# Altium integrated library ATK-DLRK3506B V1.0.IntLib: 64 symbols
Pins are listed as number, name and electrical type; pins without a type are passive.

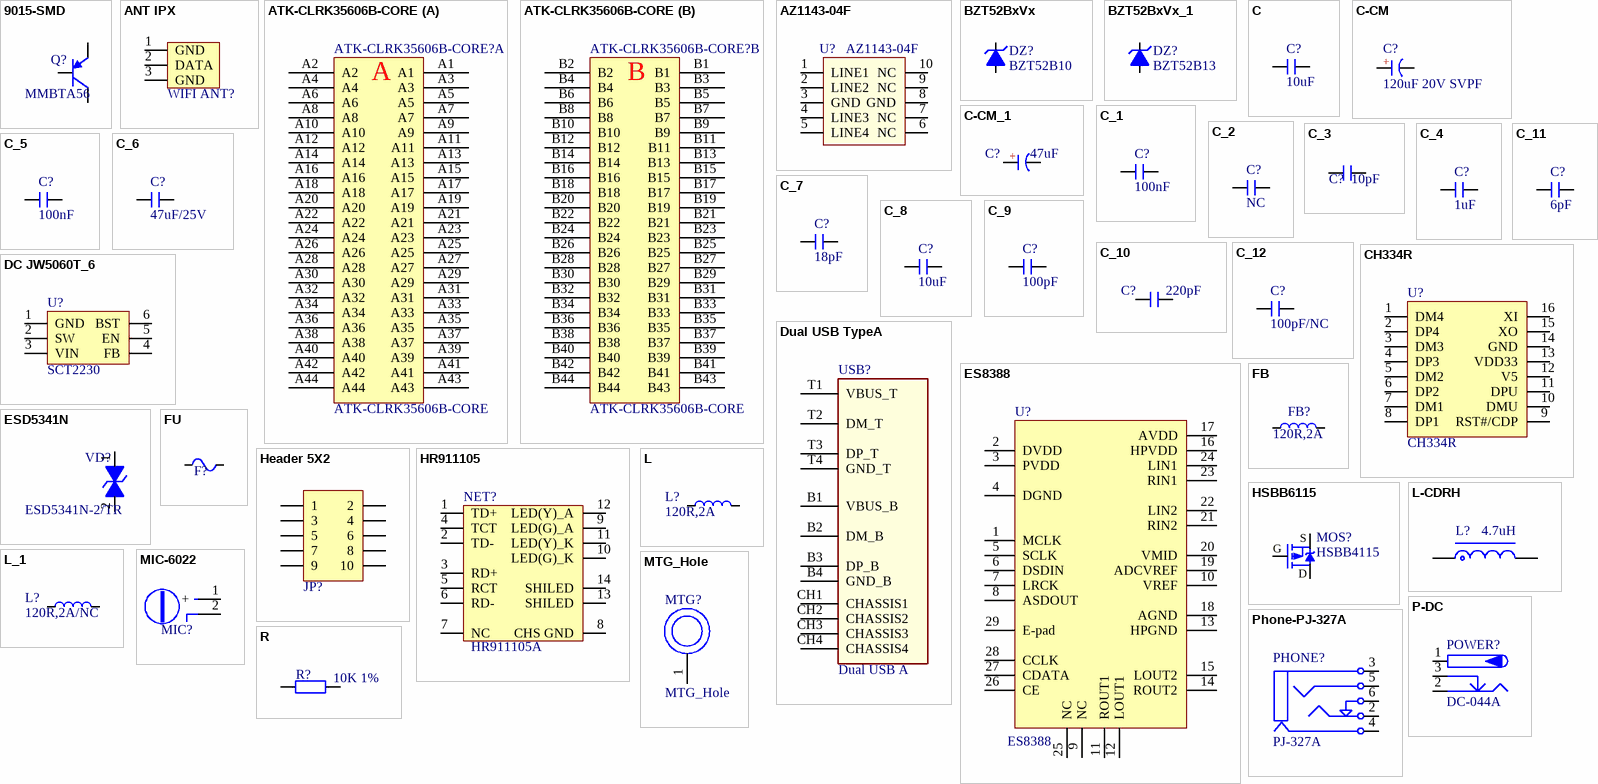
[diagram p0: symbols 9015-SMD to R]

## 9015-SMD
designator Q?, comment MMBTA56
低噪放大-PNP型; BOM名称: 三极管; 版权归属: 正点原子; 属性: 50V 0.1A 0.4W 150MHZ; 学习资源: www.ooocke.com
footprint SOT23-3N (3x1.3x1mm(长宽高))
footprint SOT23-3L (3x1.3x1mm(长宽高))
footprint SOT23-3M (3x1.3x1mm(长宽高))
pins: 1 B, 2 E, 3 C

## ANT IPX
designator WIFI ANT?  (value not drawn)
贴片射频连接器/天线座子
footprint IPX
footprint IPX
pins: 1 GND, 2 DATA, 3 GND

## ATK-CLRK35606B-CORE
designator ATK-CLRK35606B-CORE?
正点原子RK3506核心板整体封装（底板用）
footprint ATK-CLRK35606B-CORE (正点原子RK3506核心板整体封装（底板用）)
part A pins: A1, A2, A3, A4, A5, A6, A7, A8, A9, A10, A11, A12, A13, A14, A15, A16, A17, A18, A19, A20, A21, A22, A23, A24, A25, A26, A27, A28, A29, A30, A31, A32, A33, A34, A35, A36, A37, A38, A39, A40, A41, A42, A43, A44
part B pins: B1, B2, B3, B4, B5, B6, B7, B8, B9, B10, B11, B12, B13, B14, B15, B16, B17, B18, B19, B20, B21, B22, B23, B24, B25, B26, B27, B28, B29, B30, B31, B32, B33, B34, B35, B36, B37, B38, B39, B40, B41, B42, B43, B44
part A text: A
part B text: B

## AZ1143-04F
designator U?
ESD保护二极管阵列
footprint DFN2510P10E
pins: 1 LINE1, 2 LINE2, 3 GND, 4 LINE3, 5 LINE4, 6 NC, 7 NC, 8 GND, 9 NC, 10 NC

## BZT52BxVx
designator DZ?, comment BZT52B10
CJ x.xV / 0.5W稳压管  2%; 版权归属: 正点原子; BOM名称: 二极管(稳压); 学习资源: www.openedv.com
footprint SOD-123 (2.7x1.6X1.1mm（长宽高，不包括引脚）)
footprint SMB (二极管 SMB)
footprint SOD-123 (二极管)
pins: 1 A, 2 K

## BZT52BxVx_1
designator DZ?, comment BZT52B13
CJ x.xV / 0.5W稳压管  2%; 版权归属: 正点原子; BOM名称: 二极管(稳压); 学习资源: www.openedv.com
footprint SOD-123 (2.7x1.6X1.1mm（长宽高，不包括引脚）)
footprint Model Name (Model Description)
footprint Model Name (Model Description)
footprint SMB (二极管 SMB)
footprint SOD-123 (二极管)
pins: 1 A, 2 K

## C
designator C?, comment 10uF
无极性电容; BOM名称: 无极性贴片电容; 版权归属: 正点原子; 学习资源: www.openedv.com
footprint C 0402 (无极性贴片电容(0402))
pins: 1, 2

## C-CM
designator C?, comment 120uF 20V SVPF
贴片电解电容; 版权归属: 源创客; BOM名称: 贴片电解电容; 学习资源: www.ooocke.com
footprint CM A(3*5.4) (贴片电解电容，直径3mm，高5.4mm)
footprint CM B(4*5.4) (贴片电解电容，直径4mm，高5.4mm)
footprint CM C(5*5.4) (贴片电解电容，直径5mm，高5.4mm)
footprint CM D(6.3*5.4) (贴片电解电容，直径6.3mm，高5.4mm)
footprint CM D(6.3*7.7) (贴片电解电容，直径6.3mm，高7.7mm)
footprint CM E(8*6.2) (贴片电解电容，直径8mm，高6.2mm)
footprint CM E(8*10.2) (贴片电解电容，直径8mm，高10.2mm)
footprint CM F(10*10.2) (贴片电解电容，直径10mm，高10.2mm)
footprint CM G(12.5*13.5) (贴片电解电容，直径12.5mm，高13.5mm)
footprint CM G(12.5*16) (贴片电解电容，直径12.5mm，高16mm)
footprint CM H(16*16.5) (贴片电解电容，直径16mm，高16.5mm)
pins: 1 A, 2 K
text: +

## C-CM_1
designator C?, comment 47uF
贴片电解电容; 版权归属: 源创客; BOM名称: 贴片电解电容; 学习资源: www.ooocke.com
footprint CM A(3*5.4) (贴片电解电容，直径3mm，高5.4mm)
footprint CM B(4*5.4) (贴片电解电容，直径4mm，高5.4mm)
footprint CM C(5*5.4) (贴片电解电容，直径5mm，高5.4mm)
footprint CM D(6.3*5.4) (贴片电解电容，直径6.3mm，高5.4mm)
footprint CM D(6.3*7.7) (贴片电解电容，直径6.3mm，高7.7mm)
footprint CM E(8*6.2) (贴片电解电容，直径8mm，高6.2mm)
footprint CM E(8*10.2) (贴片电解电容，直径8mm，高10.2mm)
footprint CM F(10*10.2) (贴片电解电容，直径10mm，高10.2mm)
footprint CM G(12.5*13.5) (贴片电解电容，直径12.5mm，高13.5mm)
footprint CM G(12.5*16) (贴片电解电容，直径12.5mm，高16mm)
footprint CM H(16*16.5) (贴片电解电容，直径16mm，高16.5mm)
pins: 1 A, 2 K
text: +

## C_1
designator C?, comment 100nF
无极性电容; BOM名称: 无极性贴片电容; 版权归属: 正点原子; 学习资源: www.openedv.com
footprint C 0402 (无极性贴片电容(0402))
pins: 1, 2

## C_2
designator C?, comment NC
无极性电容; BOM名称: 无极性贴片电容; 版权归属: 正点原子; 学习资源: www.openedv.com
footprint C 0402 (无极性贴片电容(0402))
pins: 1, 2

## C_3
designator C?, comment 10pF
无极性电容; BOM名称: 无极性贴片电容; 版权归属: 正点原子; 学习资源: www.openedv.com
footprint C 0402 (无极性贴片电容(0402))
pins: 1, 2

## C_4
designator C?, comment 1uF
无极性贴片电容; 版权归属: 源创客; BOM名称: 无极性贴片电容; 学习资源: www.ooocke.com
footprint C 0402 (无极性贴片电容(0402))
pins: 1, 2

## C_5
designator C?, comment 100nF
无极性贴片电容; 版权归属: 源创客; BOM名称: 无极性贴片电容; 学习资源: www.ooocke.com
footprint C 0402 (无极性贴片电容(0402))
pins: 1, 2

## C_6
designator C?, comment 47uF/25V
无极性贴片电容; 版权归属: 源创客; BOM名称: 无极性贴片电容; 学习资源: www.ooocke.com
footprint C 0201 (无极性贴片电容)
footprint C 0402 (无极性贴片电容)
footprint C 0603 (无极性贴片电容)
footprint C 0805 (无极性贴片电容)
footprint C 1206 (无极性贴片电容)
footprint C 1210 (无极性贴片电容)
footprint C 1808 (无极性贴片电容)
footprint C 1812 (无极性贴片电容)
footprint C 1825 (无极性贴片电容)
footprint C 2225 (无极性贴片电容)
pins: 1, 2

## C_7
designator C?, comment 18pF
无极性电容; BOM名称: 无极性贴片电容; 版权归属: 正点原子; 学习资源: www.openedv.com
footprint C 0402 (无极性贴片电容(0402))
pins: 1, 2

## C_8
designator C?, comment 10uF
无极性贴片电容; 版权归属: 源创客; BOM名称: 无极性贴片电容; 学习资源: www.ooocke.com
footprint C 0402 (无极性贴片电容(0402))
pins: 1, 2

## C_9
designator C?, comment 100pF
无极性贴片电容; 版权归属: 源创客; BOM名称: 无极性贴片电容; 学习资源: www.ooocke.com
footprint C 0402 (无极性贴片电容(0402))
pins: 1, 2

## C_10
designator C?, comment 220pF
无极性贴片电容; 版权归属: 源创客; BOM名称: 无极性贴片电容; 学习资源: www.ooocke.com
footprint C 0402 (无极性贴片电容(0402))
pins: 1, 2

## C_11
designator C?, comment 6pF
无极性贴片电容; 版权归属: 源创客; BOM名称: 无极性贴片电容; 学习资源: www.ooocke.com
footprint C 0402 (无极性贴片电容(0402))
pins: 1, 2

## C_12
designator C?, comment 100pF/NC
无极性贴片电容; 版权归属: 源创客; BOM名称: 无极性贴片电容; 学习资源: www.ooocke.com
footprint C 0402 (无极性贴片电容(0402))
pins: 1, 2

## CH334R
designator U?
4端口USB HUB控制器, USB2.0
footprint QSOP16 (TSOP, 16-Leads, Body 4.90x3.90mm, Pitch 0.64mm, IPC Low Density)
pins: 1 DM4, 2 DP4, 3 DM3, 4 DP3, 5 DM2, 6 DP2, 7 DM1, 8 DP1, 9 RST#/CDP, 10 DMU, 11 DPU, 12 V5, 13 VDD33, 14 GND, 15 XO, 16 XI

## DC JW5060T_6
designator U?, comment SCT2230
DC降压芯片
footprint SOT23-6L (3x1.6x1.1mm(长宽高))
footprint SOT23-6M (3x1.6x1.1mm(长宽高))
footprint SOT23-6N (3x1.6x1.1mm(长宽高))
pins: 1 GND, 2 SW, 3 VIN, 4 FB, 5 EN, 6 BST

## Dual USB TypeA
designator USB?, comment Dual USB A
footprint Dual USB TypeA (双USB TypeA座)
pins: B1 VBUS_B, B2 DM_B, B3 DP_B, B4 GND_B, CH1 CHASSIS1, CH2 CHASSIS2, CH3 CHASSIS3, CH4 CHASSIS4, T1 VBUS_T, T2 DM_T, T3 DP_T, T4 GND_T

## ES8388
designator U?
footprint QFN28 4X4_L (QFN28P 长4mm，宽4mm)
pins: 1 MCLK, 2 DVDD, 3 PVDD, 4 DGND, 5 SCLK, 6 DSDIN, 7 LRCK, 8 ASDOUT, 9 NC, 10 VREF, 11 ROUT1, 12 LOUT1, 13 HPGND, 14 ROUT2, 15 LOUT2, 16 HPVDD, 17 AVDD, 18 AGND, 19 ADCVREF, 20 VMID, 21 RIN2, 22 LIN2, 23 RIN1, 24 LIN1, 25 NC, 26 CE, 27 CDATA, 28 CCLK, 29 E-pad

## ESD5341N
designator VD?, comment ESD5341N-2/TR
ESD二极管-单向
footprint ESD0402
pins: 1, 2

## FB
designator FB?, comment 120R,2A
贴片磁珠; BOM名称: 小功率贴片电感; 版权归属: 正点原子; Parameter: 电感/磁珠; 学习资源: www.openedv.com
footprint L 0402 (小功率贴片电感)
footprint L 0603 (小功率贴片电感)
footprint L 0805 (小功率贴片电感)
footprint L 1206 (小功率贴片电感)
footprint L 1210 (小功率贴片电感)
footprint L 1806 (小功率贴片电感)
footprint L 1812 (小功率贴片电感)
footprint L 1008 (2.5mm*2.0mm*1.2mm(长*宽*高）)
footprint L_2520
pins: 1, 2

## FU
designator F?, comment 2A 保险丝  (value not drawn)
贴片保险丝; 版权归属: 源创客; BOM名称: 贴片保险丝; 学习资源: www.ooocke.com
footprint FU 0402 (贴片保险丝)
footprint FU 0603 (贴片保险丝)
footprint FU 0805 (贴片保险丝)
footprint FU 1206 (贴片保险丝)
footprint FU 1210 (贴片保险丝)
footprint FU 1812 (贴片保险丝)
pins: 1, 2

## Header 5X2
designator JP?  (value not drawn)
5*2P接插件; 版权归属: 正点原子; Parameter: 接插件; BOM名称: 5*2P接插件; 学习资源: www.openedv.com
footprint HDR-5X2 (双排排针，5x2脚)
footprint IDC2.54-10P (10P简易牛角座)
footprint HDR-5X2_H (双排弯脚排针，5x2脚)
footprint PHB2.0-2x5 (长：12mm，宽：7.3mm，高：7.8mm)
footprint PHD2.0-2x5P (10脚，长：12mm，宽：5mm，高：6.5mm)
footprint HDR2.54 2x5-M-SMD (脚距：2.54mm，贴片双排母)
footprint HDR1.27 2x5-M-SMD (脚距：1.27mm，贴片双排母)
footprint HDR1.27 2x5-SMD (脚距：1.27mm，贴片双排母)
footprint Header 2.54 2X5P (排针(2X5P,2.54,直插))
pins: 1, 2, 3, 4, 5, 6, 7, 8, 9, 10

## HR911105
designator NET?, comment HR911105A
footprint HR911105A (NET_WORK)
pins: 1 TD+, 2 TD-, 3 RD+, 4 TCT, 5 RCT, 6 RD-, 7 NC, 8 CHS GND, 9 LED(G)_A, 10 LED(G)_K, 11 LED(Y)_K, 12 LED(Y)_A, 13 SHILED, 14 SHILED

## HSBB6115
designator MOS?, comment HSBB4115
PMOS -60V -8A@-4.5V 33mΩ; BOM名称: MOS管; 版权归属: 正点原子; 学习资源: www.openedv.com
footprint DFN3.3x3.3_8L_EP1
footprint VDFN10-3X3
footprint DFN8_ 3x3
pins: 1 S, 2 S, 3 G, 4 G, 5 D, 6 D, 7 D, 8 D

## L
designator L?, comment 120R,2A
小功率贴片电感磁珠; 版权归属: 正点原子; BOM名称: 小功率贴片电感; 学习资源: www.openedv.com
footprint L 0402 (小功率贴片电感)
footprint L 0603 (小功率贴片电感)
footprint L 0805 (小功率贴片电感)
footprint L 1206 (小功率贴片电感)
footprint L 1210 (小功率贴片电感)
footprint L 1806 (小功率贴片电感)
footprint L 1812 (小功率贴片电感)
footprint L 1008 (2.5mm*2.0mm*1.2mm(长*宽*高）)
footprint L_2520
pins: 1, 2

## L-CDRH
designator L?, comment 4.7uH
功率屏蔽电感; 版权归属: 源创客; BOM名称: 功率屏蔽电感; 学习资源: www.ooocke.com
footprint CDRH73 (7.3*7.3*3.4mm（长宽高）)
footprint CDRH74 (7.3*7.3*4.5mm（长宽高）)
footprint CDRH124 (12*12*4.5mm（长宽高）)
footprint CDRH125 (12*12*5mm（长宽高）)
footprint CDRH127 (12*12*8mm（长宽高）)
footprint CDRH129 (12*12*9.5mm（长宽高）)
footprint L-SMD-0420 (一体化成型电感 4*4.5*2mm（长宽高）)
pins: 1, 2

## L_1
designator L?, comment 120R,2A/NC
小功率贴片电感磁珠; 版权归属: 正点原子; BOM名称: 小功率贴片电感; 学习资源: www.openedv.com
footprint L 0402 (小功率贴片电感)
footprint L 0603 (小功率贴片电感)
footprint L 0805 (小功率贴片电感)
footprint L 1206 (小功率贴片电感)
footprint L 1210 (小功率贴片电感)
footprint L 1806 (小功率贴片电感)
footprint L 1812 (小功率贴片电感)
footprint L 1008 (2.5mm*2.0mm*1.2mm(长*宽*高）)
footprint L_2520
pins: 1, 2

## MIC-6022
designator MIC?  (value not drawn)
MIC; 版权归属: 正点原子; Parameter: 接口器件; 学习资源: www.openedv.com
footprint MIC-6022
pins: 1 +, 2 GND

## MTG_Hole
designator MTG?
螺丝孔
footprint MTG_HOLE_M3 (M3l螺丝孔)
footprint M3-6ET (Footprint not found)
pins: 1

## P-DC
designator POWER?, comment DC-044A
低压电源接口; BOM名称: DC电源接口; 版权归属: 源创客; 学习资源: www.ooocke.com
footprint DC-012 (5.5*2.1)
footprint DC-005 (5.5*2.1mm，DC30V,2.5A)
footprint DC-002 (3.5*1.1mm,)
footprint DC-003 (3.5*1.1mm)
footprint DC-003A (3.5*1.1mm)
footprint DC-050 (5.5*2.1)
footprint DC10B
footprint DC10B
footprint DC44A
footprint DC44A
footprint dc-in-th_dc-044a-25a
pins: 1 (power), 2 (power), 3 (power)

## Phone-PJ-327A
designator PHONE?, comment PJ-327A
3.5mm耳机座，带拔插检测; 版权归属: 正点原子; Parameter: 接口器件; 学习资源: www.openedv.com
footprint PJ327A (有头)
pins: 2, 3 1, 4, 5, 6

## R
designator R?, comment 10K 1%
贴片电阻; BOM名称: 电阻; 版权归属: 正点原子; 学习资源: www.openedv.com
footprint R 0402 (1/16W贴片电阻)
footprint R 0603 (1/10W贴片电阻)
pins: 1, 2

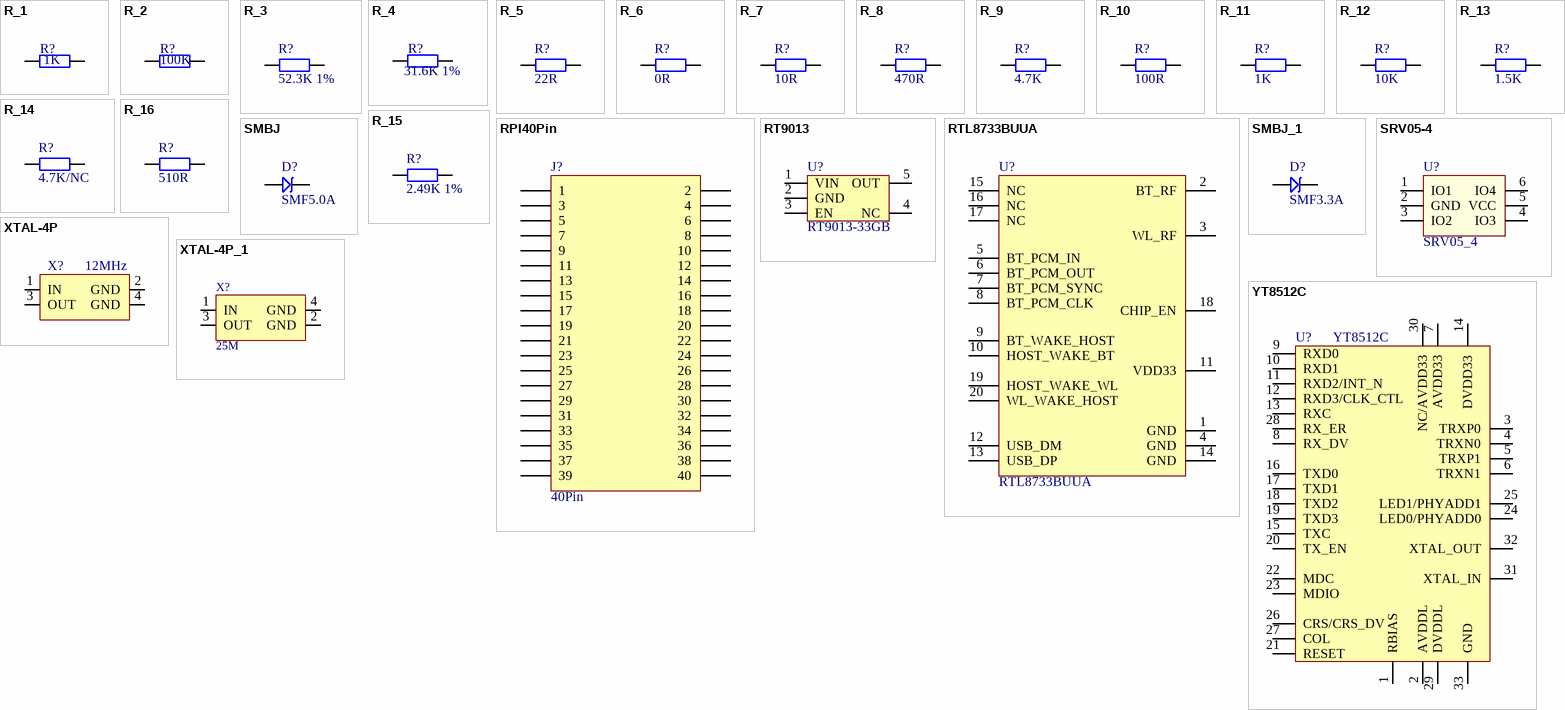
[diagram p1: symbols R_1 to YT8512C]

## R_1
designator R?, comment 1K
贴片电阻; BOM名称: 电阻; 版权归属: 正点原子; 学习资源: www.openedv.com
footprint R 0402 (1/16W贴片电阻)
footprint R 0603 (1/10W贴片电阻)
pins: 1, 2

## R_2
designator R?, comment 100K
贴片电阻; BOM名称: 电阻; 版权归属: 正点原子; 学习资源: www.openedv.com
footprint R 0402 (1/16W贴片电阻)
footprint R 0603 (1/10W贴片电阻)
pins: 1, 2

## R_3
designator R?, comment 52.3K 1%
贴片电阻; BOM名称: 电阻; 版权归属: 正点原子; 学习资源: www.openedv.com
footprint R 0402 (1/16W贴片电阻)
footprint R 0603 (1/10W贴片电阻)
pins: 1, 2

## R_4
designator R?, comment 31.6K 1%
贴片电阻; BOM名称: 电阻; 版权归属: 正点原子; 学习资源: www.openedv.com
footprint R 0402 (1/16W贴片电阻)
footprint R 0603 (1/10W贴片电阻)
pins: 1, 2

## R_5
designator R?, comment 22R
贴片电阻; BOM名称: 电阻; 版权归属: 正点原子; 学习资源: www.openedv.com
footprint R 0402 (1/16W贴片电阻)
footprint R 0603 (1/10W贴片电阻)
pins: 1, 2

## R_6
designator R?, comment 0R
贴片电阻; BOM名称: 电阻; 版权归属: 正点原子; 学习资源: www.openedv.com
footprint R 0402 (1/16W贴片电阻)
footprint R 0603 (1/10W贴片电阻)
pins: 1, 2

## R_7
designator R?, comment 10R
贴片电阻; BOM名称: 电阻; 版权归属: 正点原子; 学习资源: www.openedv.com
footprint R 0402 (1/16W贴片电阻)
footprint R 0603 (1/10W贴片电阻)
pins: 1, 2

## R_8
designator R?, comment 470R
贴片电阻; BOM名称: 电阻; 版权归属: 正点原子; 学习资源: www.openedv.com
footprint R 0402 (1/16W贴片电阻)
footprint R 0603 (1/10W贴片电阻)
pins: 1, 2

## R_9
designator R?, comment 4.7K
贴片电阻; BOM名称: 电阻; 版权归属: 正点原子; 学习资源: www.openedv.com
footprint R 0402 (1/16W贴片电阻)
footprint R 0603 (1/10W贴片电阻)
pins: 1, 2

## R_10
designator R?, comment 100R
贴片电阻; BOM名称: 电阻; 版权归属: 正点原子; 学习资源: www.openedv.com
footprint R 0402 (1/16W贴片电阻)
footprint R 0603 (1/10W贴片电阻)
pins: 1, 2

## R_11
designator R?, comment 1K
电阻; BOM名称: 贴片电阻; 版权归属: 正点原子; 学习资源: www.openedv.com; Parameter: 电阻
footprint R 0402 (1/16W贴片电阻)
pins: 1, 2

## R_12
designator R?, comment 10K
贴片电阻; BOM名称: 电阻; 版权归属: 正点原子; 学习资源: www.openedv.com
footprint R 0402 (1/16W贴片电阻)
footprint R 0603 (1/10W贴片电阻)
pins: 1, 2

## R_13
designator R?, comment 1.5K
贴片电阻; BOM名称: 电阻; 版权归属: 正点原子; 学习资源: www.openedv.com
footprint R 0402 (1/16W贴片电阻)
footprint R 0603 (1/10W贴片电阻)
pins: 1, 2

## R_14
designator R?, comment 4.7K/NC
贴片电阻; BOM名称: 电阻; 版权归属: 正点原子; 学习资源: www.openedv.com
footprint R 0402 (1/16W贴片电阻)
footprint R 0603 (1/10W贴片电阻)
pins: 1, 2

## R_15
designator R?, comment 2.49K 1%
贴片电阻; BOM名称: 电阻; 版权归属: 正点原子; 学习资源: www.openedv.com
footprint R 0402 (1/16W贴片电阻)
footprint R 0603 (1/10W贴片电阻)
pins: 1, 2

## R_16
designator R?, comment 510R
贴片电阻; BOM名称: 电阻; 版权归属: 正点原子; 学习资源: www.openedv.com
footprint R 0402 (1/16W贴片电阻)
footprint R 0603 (1/10W贴片电阻)
pins: 1, 2

## RPI40Pin
designator J?, comment 40Pin
footprint HDR-20X2 (Footprint not found)
pins: 1, 2, 3, 4, 5, 6, 7, 8, 9, 10, 11, 12, 13, 14, 15, 16, 17, 18, 19, 20, 21, 22, 23, 24, 25, 26, 27, 28, 29, 30, 31, 32, 33, 34, 35, 36, 37, 38, 39, 40

## RT9013
designator U?, comment RT9013-33GB
LDO 5.5V 500mA; BOM名称: 稳压芯片; 版权归属: 正点原子; Parameter: 芯片; 学习资源: www.openedv.com
footprint SOT23-5L (3x1.6x1.1mm(长宽高))
footprint SOT23-5N
footprint SOT23-5M (3x1.6x1.1mm(长宽高))
pins: 1 VIN, 2 GND, 3 EN, 4 NC, 5 OUT

## RTL8733BUUA
designator U?
footprint Model Name (Footprint not found)
footprint RTL8733BUBUA (RTL8733BUBUA WIFI&BT模组)
pins: 1 GND, 2 BT_RF, 3 WL_RF, 4 GND, 5 BT_PCM_IN, 6 BT_PCM_OUT, 7 BT_PCM_SYNC, 8 BT_PCM_CLK, 9 BT_WAKE_HOST, 10 HOST_WAKE_BT, 11 VDD33, 12 USB_DM, 13 USB_DP, 14 GND, 15 NC, 16 NC, 17 NC, 18 CHIP_EN, 19 HOST_WAKE_WL, 20 WL_WAKE_HOST

## SMBJ
designator D?, comment SMF5.0A
TVS
footprint SOD-123 (二极管)
pins: 1, 2

## SMBJ_1
designator D?, comment SMF3.3A
TVS
footprint SOD-123 (二极管)
pins: 1, 2

## SRV05-4
designator U?, comment SRV05_4
ESD保护二极管阵列
footprint SOT23-6N (3x1.6x1.1mm(长宽高))
pins: 1 IO1, 2 GND, 3 IO2, 4 IO3, 5 VCC, 6 IO4

## XTAL-4P
designator X?, comment 12MHz
4脚无源晶振; BOM名称: 4脚晶振; 版权归属: 正点原子; Parameter: 晶振; 学习资源: www.openedv.com
footprint XTAL-5032
footprint XTAL-3225
footprint XTAL-7050 (7mm*5mm)
pins: 1 IN, 2 GND, 3 OUT, 4 GND

## XTAL-4P_1
designator X?, comment 25M
4脚无源晶振; BOM名称: 4脚晶振; 版权归属: 源创客; 学习资源: www.ooocke.com
footprint XTAL-5032
footprint XTAL-3225
footprint XTAL-7050 (7mm*5mm)
pins: 1 IN, 2 GND, 3 OUT, 4 GND

## YT8512C
designator U?
10M/100M 网络PHY RMII/MII
footprint YT8512C
pins: 1 RBIAS, 2 AVDDL, 3 TRXP0, 4 TRXN0, 5 TRXP1, 6 TRXN1, 7 AVDD33, 8 RX_DV, 9 RXD0, 10 RXD1, 11 RXD2/INT_N, 12 RXD3/CLK_CTL, 13 RXC, 14 DVDD33, 15 TXC, 16 TXD0, 17 TXD1, 18 TXD2, 19 TXD3, 20 TX_EN, 21 RESET, 22 MDC, 23 MDIO, 24 LED0/PHYADD0, 25 LED1/PHYADD1, 26 CRS/CRS_DV, 27 COL, 28 RX_ER, 29 DVDDL, 30 NC/AVDD33, 31 XTAL_IN, 32 XTAL_OUT, 33 GND